# Altium footprint library IC.PcbLib: 204 footprints (part 6 of 13)
Each footprint in its own frame and in the unit in brackets; x right, y up, seen from the top. Pads: shape width x height; smd on the part's side, far side on the other; paste and mask are expansions set on the pad; w line width, h text height; cw(c..) or ccw(c..) is an arc to the next point about the centre after c.
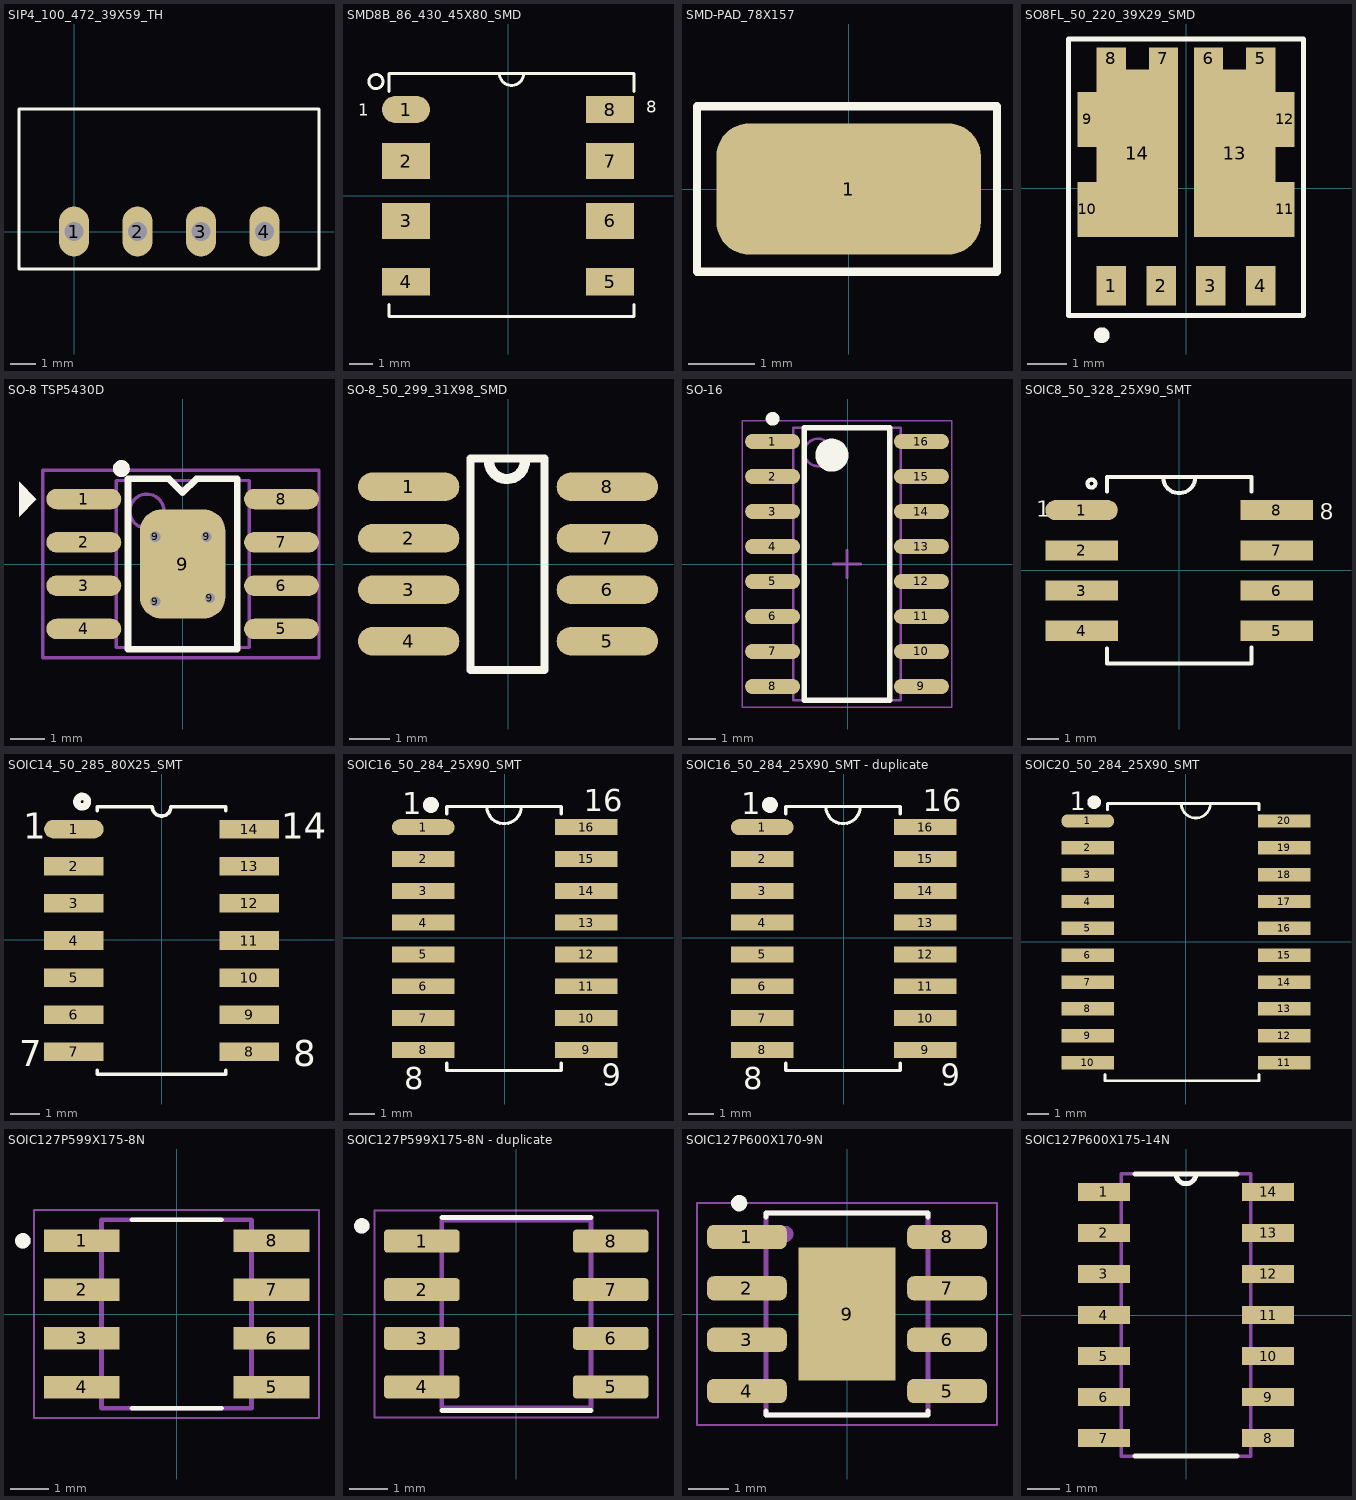
[diagram p5: the footprints below, top view; thin cyan lines are the x and y axes]

## SIP4_100_472_39X59_TH [mm] "SIP4"
height 9.982
pads (4):
  oval 1.2x2 hole 0.75 mask+0.076: 1(0,0) 2(2.54,0) 3(5.08,0) 4(7.62,0)
Top Overlay:
  lines w0.127: -1.095,4.9 9.8,4.9 9.8,-1.5 -2.2,-1.5 -2.2,4.9 -0.845,4.9
3D body "User Library-4-Lead SIP_AM1S-1205SZ_Aimtec_DC-DC_Converter_1_Watt.step": height 10.16, standoff -3.04, extent -2.042,-1.3 9.642,4.7

## SMD8B_86_430_45X80_SMD [mil] "SMD-8B"
height 144.88
pads (8):
  oval 80x45.67 smd mask+3: 1(-170,143.43)
  rect 80x59.84 smd mask+3: 2(-170,57.36) 3(-170,-42.4) 6(170,-42.4) 7(170,57.36)
  rect 80x45.67 smd mask+3: 4(-170,-143.43) 5(170,-143.43) 8(170,143.43)
Top Overlay:
  circle w5: c-220,190 r11.81
  lines w5: -198.19,-181.57 -198.19,-201.57 210,-201.57 210,-181.58 ; -198.19,173.43 -198.19,203.43 210,203.43 210,173.43 ; -14.09,203.43 ccw(c5.91,203.43) 25.91,203.43
  text "1" at -250,133.43 h20
  text "8" at 230,138.43 h20
3D body "User Library-SMD-8B.step": height 165.67, standoff 8.19, extent -187.91,-191.57 197.91,196.22

## SMD-PAD_78X157 [mil] "SMD PAD"
pads (1):
  rrect50% 157x78 smd: 1(0,0)
Top Overlay:
  lines w5: -90,-49 -90,49 88,49 88,-49 -90,-49

## SO8FL_50_220_39X29_SMD [mm] "CASE: SO8FL"
height 1.1
pads (14):
  rect 0.75x1 smd: 1(-1.905,-2.492) 2(-0.635,-2.492) 3(0.635,-2.492) 4(1.905,-2.492)
  rect 0.75x0.56 smd: 5(1.905,3.317) 6(0.575,3.317) 7(-0.575,3.317) 8(-1.905,3.317)
  rect 0.495x1.4 smd: 9(-2.527,1.757) 10(-2.527,-0.543) 11(2.527,-0.543) 12(2.527,1.757)
  rect 2.08x4.28 smd: 13(1.24,0.897) 14(-1.24,0.897)
Top Overlay:
  lines w0.127: -3,-3.25 -3,3.81 3,3.81 3,-3.25 -3,-3.25
  lines w0.2: -2.25,-3.75 cw(c-2.15,-3.75) -2.05,-3.75 cw(c-2.15,-3.75) -2.25,-3.75
3D body "User Library-DFN8-5X6 DUAL.step": height 1.11, standoff 0.01, extent -2.575,-2.775 2.575,3.375

## SO-8 TSP5430D [mm] "8-Pin Small Outline Integrated Circuit 1.27 mm Pitch, IPC Medium Density"
height 1.75
pads (13):
  oval 2.2x0.6 smd: 1(-2.9,1.905) 2(-2.9,0.635) 3(-2.9,-0.635) 4(-2.9,-1.905) 5(2.9,-1.905) 6(2.9,-0.635) 7(2.9,0.635) 8(2.9,1.905)
  round 0.4 hole 0.3: 9(-0.8,-1.1) 9(-0.8,0.8) 9(0.7,0.8) 9(0.8,-1)
  rrect50% 2.5x3.2 smd: 9(0,0)
Top Overlay:
  circle w0.25: c-1.8,2.8 r0.125
  region: -4.8,1.392 -4.292,1.9 -4.8,2.408
  lines w0.2: -1.6,-2.5 -1.6,2.5 -0.4,2.5 0,2.1 0.4,2.5 1.6,2.5 1.6,-2.5 -1.6,-2.5
Mechanical 13:
  circle w0.1: c-1.05,1.55 r0.5
  lines w0.1: -1.95,-2.45 -1.95,2.45 1.95,2.45 1.95,-2.45 -1.95,-2.45
Mechanical 15:
  lines w0.1: -0.5,0 0.5,0 ; 0,-0.5 0,0.5 ; -4.1,-2.75 -4.1,2.75 4,2.75 4,-2.75 -4.1,-2.75
3D body "User Library-sop-8.STEP": height 1.6, standoff 0, extent -2.894,-2.434 3.148,2.586

## SO-8_50_299_31X98_SMD [mm] "SOIC, 8-Leads, Body 4.9x3.9mm, Pitch 1.27mm, IPC Low Density"
height 1.75
pads (8):
  oval 2.5x0.7 smd: 1(-2.45,1.905) 2(-2.45,0.635) 3(-2.45,-0.635) 4(-2.45,-1.905) 5(2.45,-1.905) 6(2.45,-0.635) 7(2.45,0.635) 8(2.45,1.905)
Top Overlay:
  lines w0.2: -0.925,-2.616 0.9,-2.616 0.9,2.6 -0.925,2.6 -0.925,-2.616
  lines w0.254: -0.466,2.489 ccw(c-0.025,2.54) 0.418,2.54
3D body "SO-8.STEP": height 1.5, standoff 0, extent -2.76,-2.45 3.268,2.45

## SO-16 [mm] "SOIC, 16-Leads, Body 9.9x3.9mm, Pitch 1.27mm, IPC Medium Density"
height 1.75
pads (16):
  oval 2x0.55 smd: 1(-2.727,4.455) 2(-2.727,3.185) 3(-2.727,1.915) 4(-2.727,0.645) 5(-2.727,-0.625) 6(-2.727,-1.895) 7(-2.727,-3.165) 8(-2.727,-4.435) 9(2.673,-4.435) 10(2.673,-3.165) 11(2.673,-1.895) 12(2.673,-0.625) 13(2.673,0.645) 14(2.673,1.915) 15(2.673,3.185) 16(2.673,4.455)
Top Overlay:
  circle w0.6: c-0.577,3.96 r0.3
  circle w0.25: c-2.727,5.28 r0.125
  lines w0.2: -1.577,-4.94 1.523,-4.94 1.523,4.96 -1.577,4.96 -1.577,-4.94
Mechanical 13:
  circle w0.1: c-1.077,4.06 r0.5
  lines w0.1: -1.977,-4.94 1.923,-4.94 1.923,4.96 -1.977,4.96 -1.977,-4.94
Mechanical 15:
  lines w0.05: -3.837,-5.19 3.783,-5.19 3.783,5.21 -3.837,5.21 -3.837,-5.19
  lines w0.1: -0.527,0.01 0.473,0.01 ; -0.027,-0.49 -0.027,0.51
3D body "User Library-SOIC-16-1.step": height 1.4, standoff 0, extent -3.027,-4.94 2.973,4.96

## SOIC8_50_328_25X90_SMT [mil] "SOIC"
height 68.9
pads (8):
  oval 90x25 smd mask+3: 1(-121.32,75)
  rect 90x25 smd mask+3: 2(-121.32,25) 3(-121.32,-25) 4(-121.32,-75) 5(121.32,-75) 6(121.32,-25) 7(121.32,25) 8(121.32,75)
Top Overlay:
  circle w5: c-109,108 r4.92
  lines w5: -90,-97 -90,-116 90,-116 90,-96 ; -90,98 -90,116 90,116 90,98 ; -20,116 ccw(c0,116) 20,116
  text "1" at -178,67 h20
  text "8" at 175,63 h20
3D body "SOIC08 narrow.stp": height 78.74, standoff 0.13, extent -121.32,-98.42 121.32,98.43

## SOIC14_50_285_80X25_SMT [mil] "SOIC, 14-Leads, Body 8.56x3.90mm, Pitch 1.27mm, IPC Medium Density"
height 104.33
pads (14):
  oval 80x25 smd: 1(-118.11,149.01)
  rect 80x25 smd: 2(-118.11,99.01) 3(-118.11,49.01) 4(-118.11,-0.99) 5(-118.11,-50.99) 6(-118.11,-100.99) 7(-118.11,-150.99) 8(118.11,-150.99) 9(118.11,-100.99) 10(118.11,-50.99) 11(118.11,-0.99) 12(118.11,49.01) 13(118.11,99.01) 14(118.11,149.01)
Top Overlay:
  circle w10: c-107,186 r7.07
  lines w5: -86.51,-175.99 -86.51,-180.99 85.99,-180.99 ; -86.51,174.01 -86.51,179.01 ; -85.01,179.01 -13.01,179.01 ; -12.51,179.01 ccw(c-0.01,179.01) 12.49,179.01 ; 12.99,179.01 85.99,179.01 ; 86.49,-180.99 86.49,-175.99 ; 86.49,174.01 86.49,179.01
  text "1" at -186.01,136.01 h35
  text "14" at 160.99,136.01 h35
  text "7" at -192.01,-169.99 h35
  text "8" at 176.99,-169.99 h35
3D body "SOIC127P620X265-14N.step": height 104.33, standoff 0, extent -120,-169.29 122.13,169.29
3D body "so14-1.step": height 65.93, standoff -1, extent -118.11,-174.21 118.11,172.25

## SOIC16_50_284_25X90_SMT [mm]
pads (16):
  oval 2.5x0.635 smd mask+0.076: 1(-3.25,4.42)
  rect 2.5x0.635 smd mask+0.076: 2(-3.25,3.15) 3(-3.25,1.88) 4(-3.25,0.61) 5(-3.25,-0.66) 6(-3.25,-1.93) 7(-3.25,-3.2) 8(-3.25,-4.47) 9(3.25,-4.47) 10(3.25,-3.2) 11(3.25,-1.93) 12(3.25,-0.66) 13(3.25,0.61) 14(3.25,1.88) 15(3.25,3.15) 16(3.25,4.42)
Top Overlay:
  circle w0.381: c-2.946,5.309 r0.127
  lines w0.127: -2.311,-5.003 -2.311,-5.295 2.261,-5.295 2.261,-5.003 ; -2.311,4.953 -2.311,5.246 2.261,5.246 2.261,4.953 ; -0.712,5.246 ccw(c-0.025,5.246) 0.662,5.246
  text "1" at -4.089,4.928 h0.89
  text "8" at -4.016,-6.032 h0.89
  text "9" at 3.878,-5.909 h0.89
  text "16" at 3.15,5.055 h0.89
3D body "SOIC-16-1.step": height 1.4, standoff 0, extent -3.025,-4.975 2.975,4.925

## SOIC16_50_284_25X90_SMT - duplicate [mm]
pads (16):
  oval 2.5x0.635 smd mask+0.076: 1(-3.25,4.42)
  rect 2.5x0.635 smd mask+0.076: 2(-3.25,3.15) 3(-3.25,1.88) 4(-3.25,0.61) 5(-3.25,-0.66) 6(-3.25,-1.93) 7(-3.25,-3.2) 8(-3.25,-4.47) 9(3.25,-4.47) 10(3.25,-3.2) 11(3.25,-1.93) 12(3.25,-0.66) 13(3.25,0.61) 14(3.25,1.88) 15(3.25,3.15) 16(3.25,4.42)
Top Overlay:
  circle w0.381: c-2.946,5.309 r0.127
  lines w0.127: -2.311,-5.003 -2.311,-5.295 2.261,-5.295 2.261,-5.003 ; -2.311,4.953 -2.311,5.246 2.261,5.246 2.261,4.953 ; -0.712,5.246 ccw(c-0.025,5.246) 0.662,5.246
  text "16" at 3.15,5.055 h0.89
  text "9" at 3.878,-5.909 h0.89
  text "8" at -4.016,-6.032 h0.89
  text "1" at -4.089,4.928 h0.89
3D body "SOIC-16-1.step": height 1.4, standoff 0, extent -3.025,-4.975 2.975,4.925

## SOIC20_50_284_25X90_SMT [mm]
pads (20):
  oval 2.5x0.635 smd mask+0.076: 1(-4.65,5.715)
  rect 2.5x0.635 smd mask+0.076: 2(-4.65,4.445) 3(-4.65,3.175) 4(-4.65,1.905) 5(-4.65,0.635) 6(-4.65,-0.635) 7(-4.65,-1.905) 8(-4.65,-3.175) 9(-4.65,-4.445) 10(-4.65,-5.715) 11(4.65,-5.715) 12(4.65,-4.445) 13(4.65,-3.175) 14(4.65,-1.905) 15(4.65,-0.635) 16(4.65,0.635) 17(4.65,1.905) 18(4.65,3.175) 19(4.65,4.445) 20(4.65,5.715)
Top Overlay:
  circle w0.381: c-4.346,6.604 r0.127
  lines w0.127: -3.836,-6.283 -3.836,-6.575 3.45,-6.575 3.45,-6.283 ; -3.711,6.248 -3.711,6.54 3.45,6.54 3.45,6.248 ; -0.224,6.54 ccw(c0.463,6.54) 1.15,6.54
  text "1" at -5.489,6.223 h0.89
3D body "User Library-SOIC20.step": height 2.25, standoff 0.01, extent -5.067,-6.3 5.067,6.3

## SOIC127P599X175-8N [mm]
height 1.753
pads (8):
  rect 1.97x0.59 smd paste+0 mask+0.102: 1(-2.47,1.905) 2(-2.47,0.635) 3(-2.47,-0.635) 4(-2.47,-1.905) 5(2.47,-1.905) 6(2.47,-0.635) 7(2.47,0.635) 8(2.47,1.905)
Top Overlay:
  circle w0.2: c-4,1.905 r0.1
  lines w0.127: -1.165,-2.451 1.165,-2.451 ; -1.165,2.451 1.165,2.451
Mechanical 13:
  circle w0.2: c-4,1.905 r0.1
  lines w0.127: -1.949,-2.451 -1.949,2.451 1.949,2.451 1.949,-2.451 -1.949,-2.451
Mechanical 15:
  lines w0.05: -3.705,-2.701 3.705,-2.701 3.705,2.701 -3.705,2.701 -3.705,-2.701
3D body "step_temp.STEP": height 1.75, standoff 0, extent -2.995,-2.451 2.995,2.451

## SOIC127P599X175-8N - duplicate [mm]
pads (8):
  rrect25% 1.97x0.6 smd paste+0 mask+0.102: 1(-2.47,1.905) 2(-2.47,0.635) 3(-2.47,-0.635) 4(-2.47,-1.905) 5(2.47,-1.905) 6(2.47,-0.635) 7(2.47,0.635) 8(2.47,1.905)
Top Overlay:
  circle w0.2: c-4.04,2.305 r0.1
  lines w0.127: -1.95,-2.525 1.95,-2.525 ; -1.95,2.525 1.95,2.525
Mechanical 13:
  circle w0.2: c-4.04,2.305 r0.1
  lines w0.127: -1.95,-2.452 1.95,-2.452 1.95,2.452 -1.95,2.452 -1.95,-2.452
Mechanical 15:
  lines w0.05: -3.705,-2.702 3.705,-2.702 3.705,2.702 -3.705,2.702 -3.705,-2.702
  text "+" at -0.214,-0.322 h1
3D body "step_temp.STEP": height 1.75, standoff 0, extent -2.995,-2.452 2.995,2.452

## SOIC127P600X170-9N [mm]
pads (9):
  rrect54% 1.97x0.6 smd paste+0 mask+0.102: 1(-2.475,1.905) 2(-2.475,0.635) 3(-2.475,-0.635) 4(-2.475,-1.905) 5(2.475,-1.905) 6(2.475,-0.635) 7(2.475,0.635) 8(2.475,1.905)
  rect 2.41x3.3 smd paste-3 mask+0.102: 9(0,0)
Top Overlay:
  circle w0.2: c-2.667,2.74 r0.1
  lines w0.127: -2,-2.4 -2,-2.5 2,-2.5 2,-2.4 ; -2,2.4 -2,2.5 2,2.5 2,2.4
Top Paste:
  region: 0.935,0.135 0.135,0.135 0.135,1.375 0.935,1.375
  region: 0.935,-1.377 0.135,-1.377 0.135,-0.135 0.935,-0.135
  region: -0.135,-1.378 -0.937,-1.378 -0.937,-0.135 -0.135,-0.135
  region: -0.135,0.135 -0.937,0.135 -0.937,1.375 -0.135,1.375
Mechanical 13:
  circle w0.2: c-1.524,1.978 r0.1
  lines w0.127: -2,-2.5 2,-2.5 2,2.5 -2,2.5 -2,-2.5
Mechanical 15:
  lines w0.05: -3.71,-2.75 3.71,-2.75 3.71,2.75 -3.71,2.75 -3.71,-2.75
3D body "step_temp.STEP": height 1.7, standoff 0, extent -3,-2.45 3,2.45

## SOIC127P600X175-14N [mil]
pads (14):
  rect 63x22 smd paste+0 mask+4.02: 1(-100,150) 2(-100,100) 3(-100,50) 4(-100,0) 5(-100,-50) 6(-100,-100) 7(-100,-150) 8(100,-150) 9(100,-100) 10(100,-50) 11(100,0) 12(100,50) 13(100,100) 14(100,150)
Top Overlay:
  lines w6: -62,-172 62,-172 ; -62,172 -12,172 ; 62,172 12,172 ; -12,172 ccw(c0,172) 12,172 ; -12,172 12,172
Mechanical 13:
  lines w0: -12,172 ccw(c0,172) 12,172 ; -12,172 12,172 ; -12,172 -79,172 -79,-172 79,-172 79,172 12,172 ; -118,-160 -118,-140 -79,-140 -79,-160 -118,-160 ; -118,-110 -118,-90 -79,-90 -79,-110 -118,-110 ; -118,-60 -118,-40 -79,-40 -79,-60 -118,-60 ; -118,-10 -118,10 -79,10 -79,-10 -118,-10 ; -118,40 -118,60 -79,60 -79,40 -118,40 ; -118,90 -118,110 -79,110 -79,90 -118,90 ; -118,140 -118,160 -79,160 -79,140 -118,140 ; 79,-160 79,-140 118,-140 118,-160 79,-160 ; 79,-110 79,-90 118,-90 118,-110 79,-110 ; 79,-60 79,-40 118,-40 118,-60 79,-60 ; 79,-10 79,10 118,10 118,-10 79,-10 ; 79,40 79,60 118,60 118,40 79,40 ; 79,90 79,110 118,110 118,90 79,90 ; 79,140 79,160 118,160 118,140 79,140
  lines w3.94: -79,-172 79,-172 79,172 -79,172 -79,-172
3D body "step_temp.STEP": height 68.9, standoff 0, extent -118.11,-169.78 118.11,169.78